# EAGLE library part SPV1050TTR (library astra)
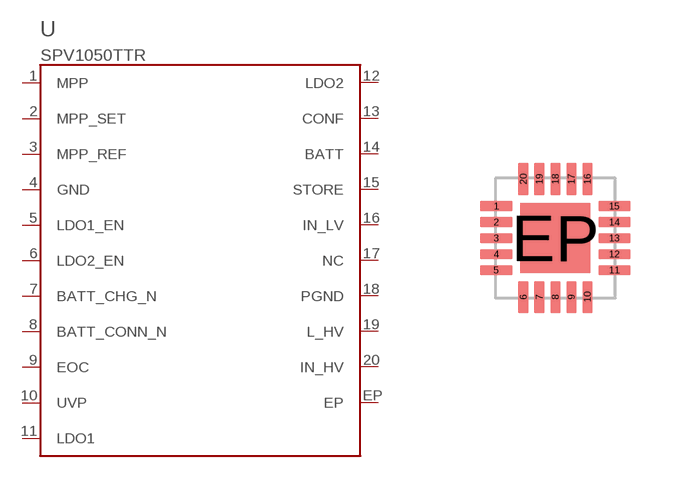
[diagram p1: symbol with the pads of SPV_VFQFPN20; footprint SPV_VFQFPN20]

Designator prefix U

## SPV1050TTR  [SPV_VFQFPN20]
1  MPP  in
2  MPP_SET  in
3  MPP_REF  in
4  GND  pwr
5  LDO1_EN  in
6  LDO2_EN  in
7  BATT_CHG_N  oc
8  BATT_CONN_N  oc
9  EOC  in
10  UVP  in
11  LDO1  out
12  LDO2  out
13  CONF  in
14  BATT
15  STORE  out
16  IN_LV
17  NC  nc
18  PGND  pwr
19  L_HV
20  IN_HV  pwr
EP  EP  pwr

## Footprint SPV_VFQFPN20 (pad centres in mm)
ST SPV1050 DS10044 rev8, manufacturer footprint figure 26, p25. 3.75 overall, 0.80 by 0.25 edge lands (ST nominal 0.20 widened to match JLC 0.25 ordinary pad minimum and maximum terminal width), 1.75 EP. Pin numbering per top view. https://www.st.com/resource/en/datasheet/spv1050.pdf
smd 0.8 x 0.25: 1 -1.475,0.8; 2 -1.475,0.4; 3 -1.475,0; 4 -1.475,-0.4; 5 -1.475,-0.8; 11 1.475,-0.8; 12 1.475,-0.4; 13 1.475,0; 14 1.475,0.4; 15 1.475,0.8
smd 0.25 x 0.8: 6 -0.8,-1.475; 7 -0.4,-1.475; 8 0,-1.475; 9 0.4,-1.475; 10 0.8,-1.475; 16 0.8,1.475; 17 0.4,1.475; 18 0,1.475; 19 -0.4,1.475; 20 -0.8,1.475
smd 1.75 x 1.75: EP 0,0